# Altium footprint library R_1206_3216Metric.PcbLib: 1 footprints
Each footprint in its own frame and in the unit in brackets; x right, y up, seen from the top. Pads: shape width x height; smd on the part's side, far side on the other; paste and mask are expansions set on the pad; w line width, h text height; cw(c..) or ccw(c..) is an arc to the next point about the centre after c.
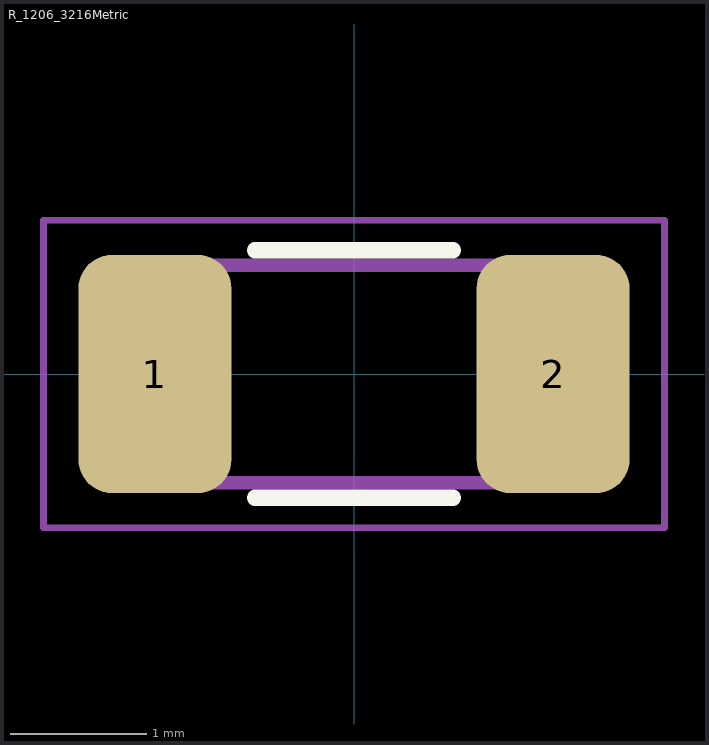
[diagram p0: the footprint, top view; thin cyan lines are the x and y axes]

## R_1206_3216Metric [mm] "Resistor SMD 1206 (3216 Metric); IPC-7351B chip density B; generated by ecadlib"
pads (2):
  rrect44% 1.125x1.75 smd: 1(-1.462,0) 2(1.462,0)
Top Overlay:
  lines w0.12: -0.727,-0.91 0.727,-0.91 ; -0.727,0.91 0.727,0.91
  text ".Designator" at -1.391,1.33 h1
Mechanical 13:
  lines w0.1: -1.6,-0.8 1.6,-0.8 1.6,0.8 -1.6,0.8 -1.6,-0.8
  text ".Comment" at -3.708,-2.33 h1
Mechanical 15:
  lines w0.05: -2.28,-1.13 2.28,-1.13 2.28,1.13 -2.28,1.13 -2.28,-1.13